# Altium footprint library WR-PHD_Socket Header.PcbLib: 279 footprints (part 3 of 18)
Each footprint in its own frame and in the unit in brackets; x right, y up, seen from the top. Pads: shape width x height; smd on the part's side, far side on the other; paste and mask are expansions set on the pad; w line width, h text height; cw(c..) or ccw(c..) is an arc to the next point about the centre after c.
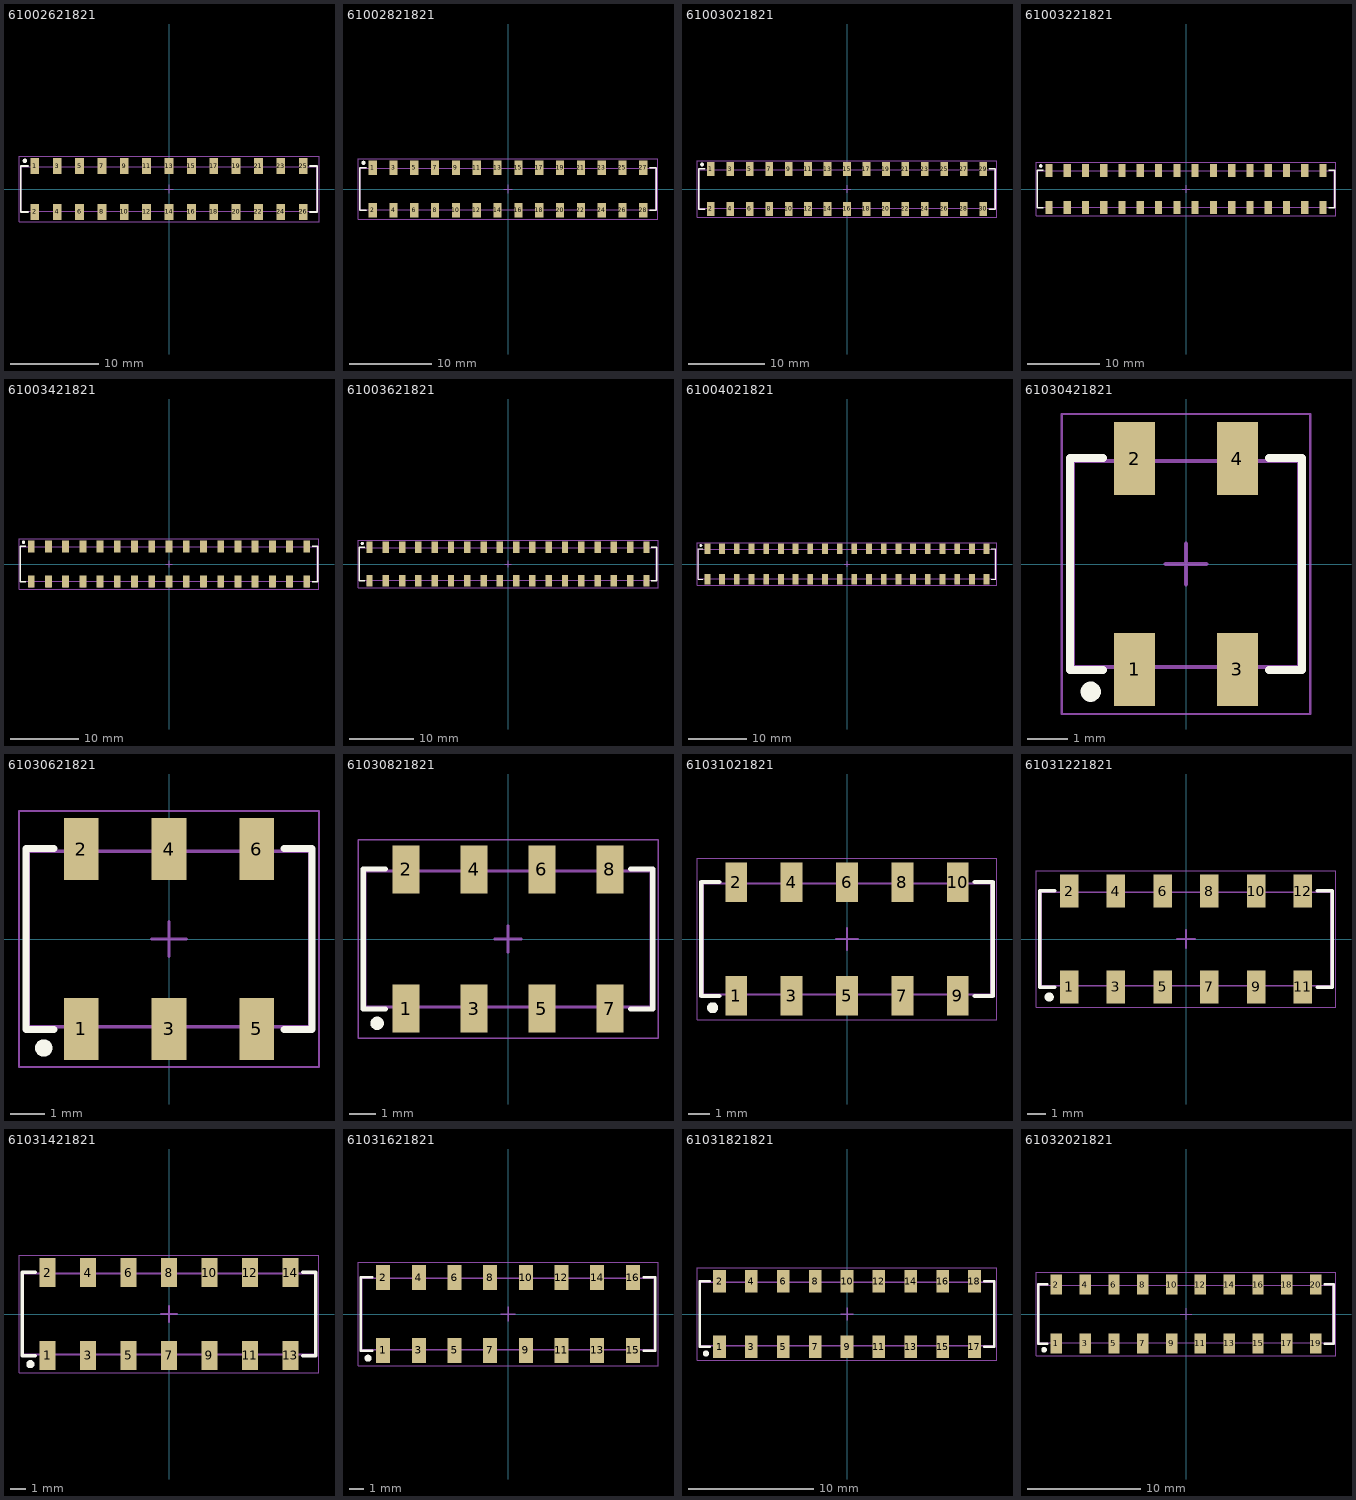
[diagram p2: the footprints below, top view; thin cyan lines are the x and y axes]

## 61002621821 [mm] "Socket Header, Pitch 2.54 mm, SMT, Vertical, dual row, 26p"
height 7.45
pads (26):
  rect 1x1.8 smd: 1(-15.24,2.6) 2(-15.24,-2.6) 3(-12.7,2.6) 4(-12.7,-2.6) 5(-10.16,2.6) 6(-10.16,-2.6) 7(-7.62,2.6) 8(-7.62,-2.6) 9(-5.08,2.6) 10(-5.08,-2.6) 11(-2.54,2.6) 12(-2.54,-2.6) 13(0,2.6) 14(0,-2.6) 15(2.54,2.6) 16(2.54,-2.6) 17(5.08,2.6) 18(5.08,-2.6) 19(7.62,2.6) 20(7.62,-2.6) 21(10.16,2.6) 22(10.16,-2.6) 23(12.7,2.6) 24(12.7,-2.6) 25(15.24,2.6) 26(15.24,-2.6)
Top Overlay:
  circle w0.25: c-16.37,3.2 r0.125
  lines w0.2: -16.02,-2.615 -16.835,-2.615 -16.835,2.615 -16.02,2.615 ; 16.02,-2.615 16.835,-2.615 16.835,2.615 16.02,2.615
Top Component Outline:
  lines w0.1: -15.56,-2.54 -15.56,-3.35 -14.92,-3.35 -14.92,-2.54 ; -15.56,2.54 -15.56,3.35 -14.92,3.35 -14.92,2.54 ; -13.02,-2.54 -13.02,-3.35 -12.38,-3.35 -12.38,-2.54 ; -13.02,2.54 -13.02,3.35 -12.38,3.35 -12.38,2.54 ; -10.48,-2.54 -10.48,-3.35 -9.84,-3.35 -9.84,-2.54 ; -10.48,2.54 -10.48,3.35 -9.84,3.35 -9.84,2.54 ; -7.94,-2.54 -7.94,-3.35 -7.3,-3.35 -7.3,-2.54 ; -7.94,2.54 -7.94,3.35 -7.3,3.35 -7.3,2.54 ; -5.4,-2.54 -5.4,-3.35 -4.76,-3.35 -4.76,-2.54 ; -5.4,2.54 -5.4,3.35 -4.76,3.35 -4.76,2.54 ; -2.86,-2.54 -2.86,-3.35 -2.22,-3.35 -2.22,-2.54 ; -2.86,2.54 -2.86,3.35 -2.22,3.35 -2.22,2.54 ; -0.32,-2.54 -0.32,-3.35 0.32,-3.35 0.32,-2.54 ; -0.32,2.54 -0.32,3.35 0.32,3.35 0.32,2.54 ; 2.22,-2.54 2.22,-3.35 2.86,-3.35 2.86,-2.54 ; 2.22,2.54 2.22,3.35 2.86,3.35 2.86,2.54 ; 4.76,-2.54 4.76,-3.35 5.4,-3.35 5.4,-2.54 ; 4.76,2.54 4.76,3.35 5.4,3.35 5.4,2.54 ; 7.3,-2.54 7.3,-3.35 7.94,-3.35 7.94,-2.54 ; 7.3,2.54 7.3,3.35 7.94,3.35 7.94,2.54 ; 9.84,-2.54 9.84,-3.35 10.48,-3.35 10.48,-2.54 ; 9.84,2.54 9.84,3.35 10.48,3.35 10.48,2.54 ; 12.38,-2.54 12.38,-3.35 13.02,-3.35 13.02,-2.54 ; 12.38,2.54 12.38,3.35 13.02,3.35 13.02,2.54 ; 14.92,-2.54 14.92,-3.35 15.56,-3.35 15.56,-2.54 ; 14.92,2.54 14.92,3.35 15.56,3.35 15.56,2.54 ; -16.76,-2.54 -16.76,2.54 16.76,2.54 16.76,-2.54 -16.76,-2.54
Top Designator:
  text ".Designator" at -3.647,-0.357 h1
Top Courtyard:
  lines w0.05: -17.035,-3.7 17.035,-3.7 17.035,3.7 -17.035,3.7 -17.035,-3.7
Top Component Center:
  lines w0.1: -0.5,0 0.5,0 ; 0,-0.5 0,0.5
3D body "61002621821.stp": height 8.5, standoff 0, extent -16.51,-3.35 16.51,3.35

## 61002821821 [mm] "Socket Header, Pitch 2.54 mm, SMT, Vertical, dual row, 28p"
height 7.45
pads (28):
  rect 1x1.8 smd: 1(-16.51,2.6) 2(-16.51,-2.6) 3(-13.97,2.6) 4(-13.97,-2.6) 5(-11.43,2.6) 6(-11.43,-2.6) 7(-8.89,2.6) 8(-8.89,-2.6) 9(-6.35,2.6) 10(-6.35,-2.6) 11(-3.81,2.6) 12(-3.81,-2.6) 13(-1.27,2.6) 14(-1.27,-2.6) 15(1.27,2.6) 16(1.27,-2.6) 17(3.81,2.6) 18(3.81,-2.6) 19(6.35,2.6) 20(6.35,-2.6) 21(8.89,2.6) 22(8.89,-2.6) 23(11.43,2.6) 24(11.43,-2.6) 25(13.97,2.6) 26(13.97,-2.6) 27(16.51,2.6) 28(16.51,-2.6)
Top Overlay:
  circle w0.25: c-17.64,3.2 r0.125
  lines w0.2: -17.29,-2.615 -18.105,-2.615 -18.105,2.615 -17.29,2.615 ; 17.29,-2.615 18.105,-2.615 18.105,2.615 17.29,2.615
Top Component Outline:
  lines w0.1: -16.83,-2.54 -16.83,-3.35 -16.19,-3.35 -16.19,-2.54 ; -16.83,2.54 -16.83,3.35 -16.19,3.35 -16.19,2.54 ; -14.29,-2.54 -14.29,-3.35 -13.65,-3.35 -13.65,-2.54 ; -14.29,2.54 -14.29,3.35 -13.65,3.35 -13.65,2.54 ; -11.75,-2.54 -11.75,-3.35 -11.11,-3.35 -11.11,-2.54 ; -11.75,2.54 -11.75,3.35 -11.11,3.35 -11.11,2.54 ; -9.21,-2.54 -9.21,-3.35 -8.57,-3.35 -8.57,-2.54 ; -9.21,2.54 -9.21,3.35 -8.57,3.35 -8.57,2.54 ; -6.67,-2.54 -6.67,-3.35 -6.03,-3.35 -6.03,-2.54 ; -6.67,2.54 -6.67,3.35 -6.03,3.35 -6.03,2.54 ; -4.13,-2.54 -4.13,-3.35 -3.49,-3.35 -3.49,-2.54 ; -4.13,2.54 -4.13,3.35 -3.49,3.35 -3.49,2.54 ; -1.59,-2.54 -1.59,-3.35 -0.95,-3.35 -0.95,-2.54 ; -1.59,2.54 -1.59,3.35 -0.95,3.35 -0.95,2.54 ; 0.95,-2.54 0.95,-3.35 1.59,-3.35 1.59,-2.54 ; 0.95,2.54 0.95,3.35 1.59,3.35 1.59,2.54 ; 3.49,-2.54 3.49,-3.35 4.13,-3.35 4.13,-2.54 ; 3.49,2.54 3.49,3.35 4.13,3.35 4.13,2.54 ; 6.03,-2.54 6.03,-3.35 6.67,-3.35 6.67,-2.54 ; 6.03,2.54 6.03,3.35 6.67,3.35 6.67,2.54 ; 8.57,-2.54 8.57,-3.35 9.21,-3.35 9.21,-2.54 ; 8.57,2.54 8.57,3.35 9.21,3.35 9.21,2.54 ; 11.11,-2.54 11.11,-3.35 11.75,-3.35 11.75,-2.54 ; 11.11,2.54 11.11,3.35 11.75,3.35 11.75,2.54 ; 13.65,-2.54 13.65,-3.35 14.29,-3.35 14.29,-2.54 ; 13.65,2.54 13.65,3.35 14.29,3.35 14.29,2.54 ; 16.19,-2.54 16.19,-3.35 16.83,-3.35 16.83,-2.54 ; 16.19,2.54 16.19,3.35 16.83,3.35 16.83,2.54 ; -18.03,-2.54 -18.03,2.54 18.03,2.54 18.03,-2.54 -18.03,-2.54
Top Designator:
  text ".Designator" at -3.647,-0.357 h1
Top Courtyard:
  lines w0.05: -18.305,-3.7 -18.305,3.7 18.305,3.7 18.305,-3.7 -18.305,-3.7
Top Component Center:
  lines w0.1: -0.5,0 0.5,0 ; 0,-0.5 0,0.5
3D body "61002821821.stp": height 8.5, standoff 0, extent -17.78,-3.35 17.78,3.35

## 61003021821 [mm] "Socket Header, Pitch 2.54 mm, SMT, Vertical, dual row, 30p"
height 7.45
pads (30):
  rect 1x1.8 smd: 1(-17.78,2.6) 2(-17.78,-2.6) 3(-15.24,2.6) 4(-15.24,-2.6) 5(-12.7,2.6) 6(-12.7,-2.6) 7(-10.16,2.6) 8(-10.16,-2.6) 9(-7.62,2.6) 10(-7.62,-2.6) 11(-5.08,2.6) 12(-5.08,-2.6) 13(-2.54,2.6) 14(-2.54,-2.6) 15(0,2.6) 16(0,-2.6) 17(2.54,2.6) 18(2.54,-2.6) 19(5.08,2.6) 20(5.08,-2.6) 21(7.62,2.6) 22(7.62,-2.6) 23(10.16,2.6) 24(10.16,-2.6) 25(12.7,2.6) 26(12.7,-2.6) 27(15.24,2.6) 28(15.24,-2.6) 29(17.78,2.6) 30(17.78,-2.6)
Top Overlay:
  circle w0.25: c-18.91,3.2 r0.125
  lines w0.2: -18.56,-2.615 -19.375,-2.615 -19.375,2.615 -18.56,2.615 ; 18.56,-2.615 19.375,-2.615 19.375,2.615 18.56,2.615
Top Component Outline:
  lines w0.1: -18.1,-2.54 -18.1,-3.35 -17.46,-3.35 -17.46,-2.54 ; -18.1,2.54 -18.1,3.35 -17.46,3.35 -17.46,2.54 ; -15.56,-2.54 -15.56,-3.35 -14.92,-3.35 -14.92,-2.54 ; -15.56,2.54 -15.56,3.35 -14.92,3.35 -14.92,2.54 ; -13.02,-2.54 -13.02,-3.35 -12.38,-3.35 -12.38,-2.54 ; -13.02,2.54 -13.02,3.35 -12.38,3.35 -12.38,2.54 ; -10.48,-2.54 -10.48,-3.35 -9.84,-3.35 -9.84,-2.54 ; -10.48,2.54 -10.48,3.35 -9.84,3.35 -9.84,2.54 ; -7.94,-2.54 -7.94,-3.35 -7.3,-3.35 -7.3,-2.54 ; -7.94,2.54 -7.94,3.35 -7.3,3.35 -7.3,2.54 ; -5.4,-2.54 -5.4,-3.35 -4.76,-3.35 -4.76,-2.54 ; -5.4,2.54 -5.4,3.35 -4.76,3.35 -4.76,2.54 ; -2.86,-2.54 -2.86,-3.35 -2.22,-3.35 -2.22,-2.54 ; -2.86,2.54 -2.86,3.35 -2.22,3.35 -2.22,2.54 ; -0.32,-2.54 -0.32,-3.35 0.32,-3.35 0.32,-2.54 ; -0.32,2.54 -0.32,3.35 0.32,3.35 0.32,2.54 ; 2.22,-2.54 2.22,-3.35 2.86,-3.35 2.86,-2.54 ; 2.22,2.54 2.22,3.35 2.86,3.35 2.86,2.54 ; 4.76,-2.54 4.76,-3.35 5.4,-3.35 5.4,-2.54 ; 4.76,2.54 4.76,3.35 5.4,3.35 5.4,2.54 ; 7.3,-2.54 7.3,-3.35 7.94,-3.35 7.94,-2.54 ; 7.3,2.54 7.3,3.35 7.94,3.35 7.94,2.54 ; 9.84,-2.54 9.84,-3.35 10.48,-3.35 10.48,-2.54 ; 9.84,2.54 9.84,3.35 10.48,3.35 10.48,2.54 ; 12.38,-2.54 12.38,-3.35 13.02,-3.35 13.02,-2.54 ; 12.38,2.54 12.38,3.35 13.02,3.35 13.02,2.54 ; 14.92,-2.54 14.92,-3.35 15.56,-3.35 15.56,-2.54 ; 14.92,2.54 14.92,3.35 15.56,3.35 15.56,2.54 ; 17.46,-2.54 17.46,-3.35 18.1,-3.35 18.1,-2.54 ; 17.46,2.54 17.46,3.35 18.1,3.35 18.1,2.54 ; -19.3,-2.54 -19.3,2.54 19.3,2.54 19.3,-2.54 -19.3,-2.54
Top Designator:
  text ".Designator" at -3.647,-0.357 h1
Top Courtyard:
  lines w0.05: -19.575,-3.7 19.575,-3.7 19.575,3.7 -19.575,3.7 -19.575,-3.7
Top Component Center:
  lines w0.1: -0.5,0 0.5,0 ; 0,-0.5 0,0.5
3D body "61003021821.stp": height 8.5, standoff 0, extent -19.05,-3.35 19.05,3.35

## 61003221821 [mm] "Socket Header, Pitch 2.54 mm, SMT, Vertical, dual row, 32p"
height 7.45
pads (32):
  rect 1x1.8 smd: 1(-19.05,2.6) 2(-19.05,-2.6) 3(-16.51,2.6) 4(-16.51,-2.6) 5(-13.97,2.6) 6(-13.97,-2.6) 7(-11.43,2.6) 8(-11.43,-2.6) 9(-8.89,2.6) 10(-8.89,-2.6) 11(-6.35,2.6) 12(-6.35,-2.6) 13(-3.81,2.6) 14(-3.81,-2.6) 15(-1.27,2.6) 16(-1.27,-2.6) 17(1.27,2.6) 18(1.27,-2.6) 19(3.81,2.6) 20(3.81,-2.6) 21(6.35,2.6) 22(6.35,-2.6) 23(8.89,2.6) 24(8.89,-2.6) 25(11.43,2.6) 26(11.43,-2.6) 27(13.97,2.6) 28(13.97,-2.6) 29(16.51,2.6) 30(16.51,-2.6) 31(19.05,2.6) 32(19.05,-2.6)
Top Overlay:
  circle w0.25: c-20.18,3.2 r0.125
  lines w0.2: -19.83,-2.615 -20.645,-2.615 -20.645,2.615 -19.83,2.615 ; 19.83,-2.615 20.645,-2.615 20.645,2.615 19.83,2.615
Top Component Outline:
  lines w0.1: -19.37,-2.54 -19.37,-3.35 -18.73,-3.35 -18.73,-2.54 ; -19.37,2.54 -19.37,3.35 -18.73,3.35 -18.73,2.54 ; -16.83,-2.54 -16.83,-3.35 -16.19,-3.35 -16.19,-2.54 ; -16.83,2.54 -16.83,3.35 -16.19,3.35 -16.19,2.54 ; -14.29,-2.54 -14.29,-3.35 -13.65,-3.35 -13.65,-2.54 ; -14.29,2.54 -14.29,3.35 -13.65,3.35 -13.65,2.54 ; -11.75,-2.54 -11.75,-3.35 -11.11,-3.35 -11.11,-2.54 ; -11.75,2.54 -11.75,3.35 -11.11,3.35 -11.11,2.54 ; -9.21,-2.54 -9.21,-3.35 -8.57,-3.35 -8.57,-2.54 ; -9.21,2.54 -9.21,3.35 -8.57,3.35 -8.57,2.54 ; -6.67,-2.54 -6.67,-3.35 -6.03,-3.35 -6.03,-2.54 ; -6.67,2.54 -6.67,3.35 -6.03,3.35 -6.03,2.54 ; -4.13,-2.54 -4.13,-3.35 -3.49,-3.35 -3.49,-2.54 ; -4.13,2.54 -4.13,3.35 -3.49,3.35 -3.49,2.54 ; -1.59,-2.54 -1.59,-3.35 -0.95,-3.35 -0.95,-2.54 ; -1.59,2.54 -1.59,3.35 -0.95,3.35 -0.95,2.54 ; 0.95,-2.54 0.95,-3.35 1.59,-3.35 1.59,-2.54 ; 0.95,2.54 0.95,3.35 1.59,3.35 1.59,2.54 ; 3.49,-2.54 3.49,-3.35 4.13,-3.35 4.13,-2.54 ; 3.49,2.54 3.49,3.35 4.13,3.35 4.13,2.54 ; 6.03,-2.54 6.03,-3.35 6.67,-3.35 6.67,-2.54 ; 6.03,2.54 6.03,3.35 6.67,3.35 6.67,2.54 ; 8.57,-2.54 8.57,-3.35 9.21,-3.35 9.21,-2.54 ; 8.57,2.54 8.57,3.35 9.21,3.35 9.21,2.54 ; 11.11,-2.54 11.11,-3.35 11.75,-3.35 11.75,-2.54 ; 11.11,2.54 11.11,3.35 11.75,3.35 11.75,2.54 ; 13.65,-2.54 13.65,-3.35 14.29,-3.35 14.29,-2.54 ; 13.65,2.54 13.65,3.35 14.29,3.35 14.29,2.54 ; 16.19,-2.54 16.19,-3.35 16.83,-3.35 16.83,-2.54 ; 16.19,2.54 16.19,3.35 16.83,3.35 16.83,2.54 ; 18.73,-2.54 18.73,-3.35 19.37,-3.35 19.37,-2.54 ; 18.73,2.54 18.73,3.35 19.37,3.35 19.37,2.54 ; -20.57,-2.54 -20.57,2.54 20.57,2.54 20.57,-2.54 -20.57,-2.54
Top Designator:
  text ".Designator" at -3.647,-0.357 h1
Top Courtyard:
  lines w0.05: -20.845,-3.7 20.845,-3.7 20.845,3.7 -20.845,3.7 -20.845,-3.7
Top Component Center:
  lines w0.1: -0.5,0 0.5,0 ; 0,-0.5 0,0.5
3D body "61003221821.stp": height 8.5, standoff 0, extent -20.32,-3.35 20.32,3.35

## 61003421821 [mm] "Socket Header, Pitch 2.54 mm, SMT, Vertical, dual row, 34p"
height 7.45
pads (34):
  rect 1x1.8 smd: 1(-20.32,2.6) 2(-20.32,-2.6) 3(-17.78,2.6) 4(-17.78,-2.6) 5(-15.24,2.6) 6(-15.24,-2.6) 7(-12.7,2.6) 8(-12.7,-2.6) 9(-10.16,2.6) 10(-10.16,-2.6) 11(-7.62,2.6) 12(-7.62,-2.6) 13(-5.08,2.6) 14(-5.08,-2.6) 15(-2.54,2.6) 16(-2.54,-2.6) 17(0,2.6) 18(0,-2.6) 19(2.54,2.6) 20(2.54,-2.6) 21(5.08,2.6) 22(5.08,-2.6) 23(7.62,2.6) 24(7.62,-2.6) 25(10.16,2.6) 26(10.16,-2.6) 27(12.7,2.6) 28(12.7,-2.6) 29(15.24,2.6) 30(15.24,-2.6) 31(17.78,2.6) 32(17.78,-2.6) 33(20.32,2.6) 34(20.32,-2.6)
Top Overlay:
  circle w0.25: c-21.45,3.2 r0.125
  lines w0.2: -21.1,-2.615 -21.915,-2.615 -21.915,2.615 -21.1,2.615 ; 21.1,-2.615 21.915,-2.615 21.915,2.615 21.1,2.615
Top Component Outline:
  lines w0.1: -20.64,-2.54 -20.64,-3.35 -20,-3.35 -20,-2.54 ; -20.64,2.54 -20.64,3.35 -20,3.35 -20,2.54 ; -18.1,-2.54 -18.1,-3.35 -17.46,-3.35 -17.46,-2.54 ; -18.1,2.54 -18.1,3.35 -17.46,3.35 -17.46,2.54 ; -15.56,-2.54 -15.56,-3.35 -14.92,-3.35 -14.92,-2.54 ; -15.56,2.54 -15.56,3.35 -14.92,3.35 -14.92,2.54 ; -13.02,-2.54 -13.02,-3.35 -12.38,-3.35 -12.38,-2.54 ; -13.02,2.54 -13.02,3.35 -12.38,3.35 -12.38,2.54 ; -10.48,-2.54 -10.48,-3.35 -9.84,-3.35 -9.84,-2.54 ; -10.48,2.54 -10.48,3.35 -9.84,3.35 -9.84,2.54 ; -7.94,-2.54 -7.94,-3.35 -7.3,-3.35 -7.3,-2.54 ; -7.94,2.54 -7.94,3.35 -7.3,3.35 -7.3,2.54 ; -5.4,-2.54 -5.4,-3.35 -4.76,-3.35 -4.76,-2.54 ; -5.4,2.54 -5.4,3.35 -4.76,3.35 -4.76,2.54 ; -2.86,-2.54 -2.86,-3.35 -2.22,-3.35 -2.22,-2.54 ; -2.86,2.54 -2.86,3.35 -2.22,3.35 -2.22,2.54 ; -0.32,-2.54 -0.32,-3.35 0.32,-3.35 0.32,-2.54 ; -0.32,2.54 -0.32,3.35 0.32,3.35 0.32,2.54 ; 2.22,-2.54 2.22,-3.35 2.86,-3.35 2.86,-2.54 ; 2.22,2.54 2.22,3.35 2.86,3.35 2.86,2.54 ; 4.76,-2.54 4.76,-3.35 5.4,-3.35 5.4,-2.54 ; 4.76,2.54 4.76,3.35 5.4,3.35 5.4,2.54 ; 7.3,-2.54 7.3,-3.35 7.94,-3.35 7.94,-2.54 ; 7.3,2.54 7.3,3.35 7.94,3.35 7.94,2.54 ; 9.84,-2.54 9.84,-3.35 10.48,-3.35 10.48,-2.54 ; 9.84,2.54 9.84,3.35 10.48,3.35 10.48,2.54 ; 12.38,-2.54 12.38,-3.35 13.02,-3.35 13.02,-2.54 ; 12.38,2.54 12.38,3.35 13.02,3.35 13.02,2.54 ; 14.92,-2.54 14.92,-3.35 15.56,-3.35 15.56,-2.54 ; 14.92,2.54 14.92,3.35 15.56,3.35 15.56,2.54 ; 17.46,-2.54 17.46,-3.35 18.1,-3.35 18.1,-2.54 ; 17.46,2.54 17.46,3.35 18.1,3.35 18.1,2.54 ; 20,-2.54 20,-3.35 20.64,-3.35 20.64,-2.54 ; 20,2.54 20,3.35 20.64,3.35 20.64,2.54 ; -21.84,-2.54 -21.84,2.54 21.84,2.54 21.84,-2.54 -21.84,-2.54
Top Designator:
  text ".Designator" at -3.647,-0.357 h1
Top Courtyard:
  lines w0.05: -22.115,-3.7 -22.115,3.7 22.115,3.7 22.115,-3.7 -22.115,-3.7
Top Component Center:
  lines w0.1: -0.5,0 0.5,0 ; 0,-0.5 0,0.5
3D body "61003421821.stp": height 7.5, standoff 0, extent -21.59,-3.35 21.59,3.35

## 61003621821 [mm] "Socket Header, Pitch 2.54 mm, SMT, Vertical, dual row, 36p"
height 7.45
pads (36):
  rect 1x1.8 smd: 1(-21.59,2.6) 2(-21.59,-2.6) 3(-19.05,2.6) 4(-19.05,-2.6) 5(-16.51,2.6) 6(-16.51,-2.6) 7(-13.97,2.6) 8(-13.97,-2.6) 9(-11.43,2.6) 10(-11.43,-2.6) 11(-8.89,2.6) 12(-8.89,-2.6) 13(-6.35,2.6) 14(-6.35,-2.6) 15(-3.81,2.6) 16(-3.81,-2.6) 17(-1.27,2.6) 18(-1.27,-2.6) 19(1.27,2.6) 20(1.27,-2.6) 21(3.81,2.6) 22(3.81,-2.6) 23(6.35,2.6) 24(6.35,-2.6) 25(8.89,2.6) 26(8.89,-2.6) 27(11.43,2.6) 28(11.43,-2.6) 29(13.97,2.6) 30(13.97,-2.6) 31(16.51,2.6) 32(16.51,-2.6) 33(19.05,2.6) 34(19.05,-2.6) 35(21.59,2.6) 36(21.59,-2.6)
Top Overlay:
  circle w0.25: c-22.72,3.2 r0.125
  lines w0.2: -22.37,-2.615 -23.185,-2.615 -23.185,2.615 -22.37,2.615 ; 22.37,-2.615 23.185,-2.615 23.185,2.615 22.37,2.615
Top Component Outline:
  lines w0.1: -21.91,-2.54 -21.91,-3.35 -21.27,-3.35 -21.27,-2.54 ; -21.91,2.54 -21.91,3.35 -21.27,3.35 -21.27,2.54 ; -19.37,-2.54 -19.37,-3.35 -18.73,-3.35 -18.73,-2.54 ; -19.37,2.54 -19.37,3.35 -18.73,3.35 -18.73,2.54 ; -16.83,-2.54 -16.83,-3.35 -16.19,-3.35 -16.19,-2.54 ; -16.83,2.54 -16.83,3.35 -16.19,3.35 -16.19,2.54 ; -14.29,-2.54 -14.29,-3.35 -13.65,-3.35 -13.65,-2.54 ; -14.29,2.54 -14.29,3.35 -13.65,3.35 -13.65,2.54 ; -11.75,-2.54 -11.75,-3.35 -11.11,-3.35 -11.11,-2.54 ; -11.75,2.54 -11.75,3.35 -11.11,3.35 -11.11,2.54 ; -9.21,-2.54 -9.21,-3.35 -8.57,-3.35 -8.57,-2.54 ; -9.21,2.54 -9.21,3.35 -8.57,3.35 -8.57,2.54 ; -6.67,-2.54 -6.67,-3.35 -6.03,-3.35 -6.03,-2.54 ; -6.67,2.54 -6.67,3.35 -6.03,3.35 -6.03,2.54 ; -4.13,-2.54 -4.13,-3.35 -3.49,-3.35 -3.49,-2.54 ; -4.13,2.54 -4.13,3.35 -3.49,3.35 -3.49,2.54 ; -1.59,-2.54 -1.59,-3.35 -0.95,-3.35 -0.95,-2.54 ; -1.59,2.54 -1.59,3.35 -0.95,3.35 -0.95,2.54 ; 0.95,-2.54 0.95,-3.35 1.59,-3.35 1.59,-2.54 ; 0.95,2.54 0.95,3.35 1.59,3.35 1.59,2.54 ; 3.49,-2.54 3.49,-3.35 4.13,-3.35 4.13,-2.54 ; 3.49,2.54 3.49,3.35 4.13,3.35 4.13,2.54 ; 6.03,-2.54 6.03,-3.35 6.67,-3.35 6.67,-2.54 ; 6.03,2.54 6.03,3.35 6.67,3.35 6.67,2.54 ; 8.57,-2.54 8.57,-3.35 9.21,-3.35 9.21,-2.54 ; 8.57,2.54 8.57,3.35 9.21,3.35 9.21,2.54 ; 11.11,-2.54 11.11,-3.35 11.75,-3.35 11.75,-2.54 ; 11.11,2.54 11.11,3.35 11.75,3.35 11.75,2.54 ; 13.65,-2.54 13.65,-3.35 14.29,-3.35 14.29,-2.54 ; 13.65,2.54 13.65,3.35 14.29,3.35 14.29,2.54 ; 16.19,-2.54 16.19,-3.35 16.83,-3.35 16.83,-2.54 ; 16.19,2.54 16.19,3.35 16.83,3.35 16.83,2.54 ; 18.73,-2.54 18.73,-3.35 19.37,-3.35 19.37,-2.54 ; 18.73,2.54 18.73,3.35 19.37,3.35 19.37,2.54 ; 21.27,-2.54 21.27,-3.35 21.91,-3.35 21.91,-2.54 ; 21.27,2.54 21.27,3.35 21.91,3.35 21.91,2.54 ; -23.11,-2.54 -23.11,2.54 23.11,2.54 23.11,-2.54 -23.11,-2.54
Top Designator:
  text ".Designator" at -3.647,-0.357 h1
Top Courtyard:
  lines w0.05: -23.385,-3.7 23.385,-3.7 23.385,3.7 -23.385,3.7 -23.385,-3.7
Top Component Center:
  lines w0.1: -0.5,0 0.5,0 ; 0,-0.5 0,0.5
3D body "61003621821.stp": height 7.5, standoff 0, extent -22.86,-3.35 22.86,3.35

## 61004021821 [mm] "Socket Header, Pitch 2.54 mm, SMT, Vertical, dual row, 40p"
height 7.45
pads (40):
  rect 1x1.8 smd: 1(-24.13,2.6) 2(-24.13,-2.6) 3(-21.59,2.6) 4(-21.59,-2.6) 5(-19.05,2.6) 6(-19.05,-2.6) 7(-16.51,2.6) 8(-16.51,-2.6) 9(-13.97,2.6) 10(-13.97,-2.6) 11(-11.43,2.6) 12(-11.43,-2.6) 13(-8.89,2.6) 14(-8.89,-2.6) 15(-6.35,2.6) 16(-6.35,-2.6) 17(-3.81,2.6) 18(-3.81,-2.6) 19(-1.27,2.6) 20(-1.27,-2.6) 21(1.27,2.6) 22(1.27,-2.6) 23(3.81,2.6) 24(3.81,-2.6) 25(6.35,2.6) 26(6.35,-2.6) 27(8.89,2.6) 28(8.89,-2.6) 29(11.43,2.6) 30(11.43,-2.6) 31(13.97,2.6) 32(13.97,-2.6) 33(16.51,2.6) 34(16.51,-2.6) 35(19.05,2.6) 36(19.05,-2.6) 37(21.59,2.6) 38(21.59,-2.6) 39(24.13,2.6) 40(24.13,-2.6)
Top Overlay:
  circle w0.25: c-25.26,3.2 r0.125
  lines w0.2: -24.91,-2.615 -25.725,-2.615 -25.725,2.615 -24.91,2.615 ; 24.91,-2.615 25.725,-2.615 25.725,2.615 24.91,2.615
Top Component Outline:
  lines w0.1: -24.45,-2.54 -24.45,-3.35 -23.81,-3.35 -23.81,-2.54 ; -24.45,2.54 -24.45,3.35 -23.81,3.35 -23.81,2.54 ; -21.91,-2.54 -21.91,-3.35 -21.27,-3.35 -21.27,-2.54 ; -21.91,2.54 -21.91,3.35 -21.27,3.35 -21.27,2.54 ; -19.37,-2.54 -19.37,-3.35 -18.73,-3.35 -18.73,-2.54 ; -19.37,2.54 -19.37,3.35 -18.73,3.35 -18.73,2.54 ; -16.83,-2.54 -16.83,-3.35 -16.19,-3.35 -16.19,-2.54 ; -16.83,2.54 -16.83,3.35 -16.19,3.35 -16.19,2.54 ; -14.29,-2.54 -14.29,-3.35 -13.65,-3.35 -13.65,-2.54 ; -14.29,2.54 -14.29,3.35 -13.65,3.35 -13.65,2.54 ; -11.75,-2.54 -11.75,-3.35 -11.11,-3.35 -11.11,-2.54 ; -11.75,2.54 -11.75,3.35 -11.11,3.35 -11.11,2.54 ; -9.21,-2.54 -9.21,-3.35 -8.57,-3.35 -8.57,-2.54 ; -9.21,2.54 -9.21,3.35 -8.57,3.35 -8.57,2.54 ; -6.67,-2.54 -6.67,-3.35 -6.03,-3.35 -6.03,-2.54 ; -6.67,2.54 -6.67,3.35 -6.03,3.35 -6.03,2.54 ; -4.13,-2.54 -4.13,-3.35 -3.49,-3.35 -3.49,-2.54 ; -4.13,2.54 -4.13,3.35 -3.49,3.35 -3.49,2.54 ; -1.59,-2.54 -1.59,-3.35 -0.95,-3.35 -0.95,-2.54 ; -1.59,2.54 -1.59,3.35 -0.95,3.35 -0.95,2.54 ; 0.95,-2.54 0.95,-3.35 1.59,-3.35 1.59,-2.54 ; 0.95,2.54 0.95,3.35 1.59,3.35 1.59,2.54 ; 3.49,-2.54 3.49,-3.35 4.13,-3.35 4.13,-2.54 ; 3.49,2.54 3.49,3.35 4.13,3.35 4.13,2.54 ; 6.03,-2.54 6.03,-3.35 6.67,-3.35 6.67,-2.54 ; 6.03,2.54 6.03,3.35 6.67,3.35 6.67,2.54 ; 8.57,-2.54 8.57,-3.35 9.21,-3.35 9.21,-2.54 ; 8.57,2.54 8.57,3.35 9.21,3.35 9.21,2.54 ; 11.11,-2.54 11.11,-3.35 11.75,-3.35 11.75,-2.54 ; 11.11,2.54 11.11,3.35 11.75,3.35 11.75,2.54 ; 13.65,-2.54 13.65,-3.35 14.29,-3.35 14.29,-2.54 ; 13.65,2.54 13.65,3.35 14.29,3.35 14.29,2.54 ; 16.19,-2.54 16.19,-3.35 16.83,-3.35 16.83,-2.54 ; 16.19,2.54 16.19,3.35 16.83,3.35 16.83,2.54 ; 18.73,-2.54 18.73,-3.35 19.37,-3.35 19.37,-2.54 ; 18.73,2.54 18.73,3.35 19.37,3.35 19.37,2.54 ; 21.27,-2.54 21.27,-3.35 21.91,-3.35 21.91,-2.54 ; 21.27,2.54 21.27,3.35 21.91,3.35 21.91,2.54 ; 23.81,-2.54 23.81,-3.35 24.45,-3.35 24.45,-2.54 ; 23.81,2.54 23.81,3.35 24.45,3.35 24.45,2.54 ; -25.65,-2.54 -25.65,2.54 25.65,2.54 25.65,-2.54 -25.65,-2.54
Top Designator:
  text ".Designator" at -3.647,-0.357 h1
Top Courtyard:
  lines w0.05: -25.925,-3.7 25.925,-3.7 25.925,3.7 -25.925,3.7 -25.925,-3.7
Top Component Center:
  lines w0.1: -0.5,0 0.5,0 ; 0,-0.5 0,0.5
3D body "61004021821.stp": height 7.5, standoff 0, extent -25.4,-3.35 25.4,3.35

## 61030421821 [mm] "Socket Header, Pitch 2.54 mm, SMT, Vertical, dual row, 4p"
height 7.45
pads (4):
  rect 1x1.8 smd: 1(-1.27,-2.6) 2(-1.27,2.6) 3(1.27,-2.6) 4(1.27,2.6)
Top Overlay:
  circle w0.25: c-2.35,-3.15 r0.125
  lines w0.2: -2.05,-2.615 -2.865,-2.615 -2.865,2.615 -2.05,2.615 ; 2.05,-2.615 2.865,-2.615 2.865,2.615 2.05,2.615
Top Component Outline:
  lines w0.1: -1.59,-2.54 -1.59,-3.35 -0.95,-3.35 -0.95,-2.54 ; -1.59,2.54 -1.59,3.35 -0.95,3.35 -0.95,2.54 ; 0.95,-2.54 0.95,-3.35 1.59,-3.35 1.59,-2.54 ; 0.95,2.54 0.95,3.35 1.59,3.35 1.59,2.54 ; -2.79,-2.54 2.79,-2.54 2.79,2.54 -2.79,2.54 -2.79,-2.54
Top Designator:
  text ".Designator" at -3.647,-0.357 h1
Top Courtyard:
  lines w0.05: -3.065,-3.7 -3.065,3.7 3.065,3.7 3.065,-3.7 -3.065,-3.7
Top Component Center:
  lines w0.1: -0.5,0 0.5,0 ; 0,-0.5 0,0.5
3D body "61030421821.stp": height 8.52, standoff -0.03, extent -2.54,-3.35 2.54,3.35

## 61030621821 [mm] "Socket Header, Pitch 2.54 mm, SMT, Vertical, dual row, 6p"
height 7.45
pads (6):
  rect 1x1.8 smd: 1(-2.54,-2.6) 2(-2.54,2.6) 3(0,-2.6) 4(0,2.6) 5(2.54,-2.6) 6(2.54,2.6)
Top Overlay:
  circle w0.25: c-3.62,-3.15 r0.125
  lines w0.2: -3.32,-2.615 -4.135,-2.615 -4.135,2.615 -3.32,2.615 ; 3.32,-2.615 4.135,-2.615 4.135,2.615 3.32,2.615
Top Component Outline:
  lines w0.1: -2.86,-2.54 -2.86,-3.35 -2.22,-3.35 -2.22,-2.54 ; -2.86,2.54 -2.86,3.35 -2.22,3.35 -2.22,2.54 ; -0.32,-2.54 -0.32,-3.35 0.32,-3.35 0.32,-2.54 ; -0.32,2.54 -0.32,3.35 0.32,3.35 0.32,2.54 ; 2.22,-2.54 2.22,-3.35 2.86,-3.35 2.86,-2.54 ; 2.22,2.54 2.22,3.35 2.86,3.35 2.86,2.54 ; -4.06,-2.54 -4.06,2.54 4.06,2.54 4.06,-2.54 -4.06,-2.54
Top Designator:
  text ".Designator" at -3.647,-0.357 h1
Top Courtyard:
  lines w0.05: -4.335,-3.7 4.335,-3.7 4.335,3.7 -4.335,3.7 -4.335,-3.7
Top Component Center:
  lines w0.1: -0.5,0 0.5,0 ; 0,-0.5 0,0.5
3D body "61030621821.stp": height 8.52, standoff 0.02, extent -3.81,-3.35 3.81,3.35

## 61030821821 [mm] "Socket Header, Pitch 2.54 mm, SMT, Vertical, dual row, 8p"
height 7.45
pads (8):
  rect 1x1.8 smd: 1(-3.81,-2.6) 2(-3.81,2.6) 3(-1.27,-2.6) 4(-1.27,2.6) 5(1.27,-2.6) 6(1.27,2.6) 7(3.81,-2.6) 8(3.81,2.6)
Top Overlay:
  circle w0.25: c-4.89,-3.15 r0.125
  lines w0.2: -4.59,-2.615 -5.405,-2.615 -5.405,2.615 -4.59,2.615 ; 4.59,-2.615 5.405,-2.615 5.405,2.615 4.59,2.615
Top Component Outline:
  lines w0.1: -4.13,-2.54 -4.13,-3.35 -3.49,-3.35 -3.49,-2.54 ; -4.13,2.54 -4.13,3.35 -3.49,3.35 -3.49,2.54 ; -1.59,-2.54 -1.59,-3.35 -0.95,-3.35 -0.95,-2.54 ; -1.59,2.54 -1.59,3.35 -0.95,3.35 -0.95,2.54 ; 0.95,-2.54 0.95,-3.35 1.59,-3.35 1.59,-2.54 ; 0.95,2.54 0.95,3.35 1.59,3.35 1.59,2.54 ; 3.49,-2.54 3.49,-3.35 4.13,-3.35 4.13,-2.54 ; 3.49,2.54 3.49,3.35 4.13,3.35 4.13,2.54 ; -5.33,-2.54 -5.33,2.54 5.33,2.54 5.33,-2.54 -5.33,-2.54
Top Designator:
  text ".Designator" at -3.647,-0.357 h1
Top Courtyard:
  lines w0.05: -5.605,-3.7 -5.605,3.7 5.605,3.7 5.605,-3.7 -5.605,-3.7
Top Component Center:
  lines w0.1: -0.5,0 0.5,0 ; 0,-0.5 0,0.5
3D body "61030821821.stp": height 8.52, standoff 0.02, extent -5.08,-3.35 5.08,3.35

## 61031021821 [mm] "Socket Header, Pitch 2.54 mm, SMT, Vertical, dual row, 10p"
height 7.45
pads (10):
  rect 1x1.8 smd: 1(-5.08,-2.6) 2(-5.08,2.6) 3(-2.54,-2.6) 4(-2.54,2.6) 5(0,-2.6) 6(0,2.6) 7(2.54,-2.6) 8(2.54,2.6) 9(5.08,-2.6) 10(5.08,2.6)
Top Overlay:
  circle w0.25: c-6.16,-3.15 r0.125
  lines w0.2: -5.86,-2.615 -6.675,-2.615 -6.675,2.615 -5.86,2.615 ; 5.86,-2.615 6.675,-2.615 6.675,2.615 5.86,2.615
Top Component Outline:
  lines w0.1: -5.4,-2.54 -5.4,-3.35 -4.76,-3.35 -4.76,-2.54 ; -5.4,2.54 -5.4,3.35 -4.76,3.35 -4.76,2.54 ; -2.86,-2.54 -2.86,-3.35 -2.22,-3.35 -2.22,-2.54 ; -2.86,2.54 -2.86,3.35 -2.22,3.35 -2.22,2.54 ; -0.32,-2.54 -0.32,-3.35 0.32,-3.35 0.32,-2.54 ; -0.32,2.54 -0.32,3.35 0.32,3.35 0.32,2.54 ; 2.22,-2.54 2.22,-3.35 2.86,-3.35 2.86,-2.54 ; 2.22,2.54 2.22,3.35 2.86,3.35 2.86,2.54 ; 4.76,-2.54 4.76,-3.35 5.4,-3.35 5.4,-2.54 ; 4.76,2.54 4.76,3.35 5.4,3.35 5.4,2.54 ; -6.6,-2.54 6.6,-2.54 6.6,2.54 -6.6,2.54 -6.6,-2.54
Top Designator:
  text ".Designator" at -3.647,-0.357 h1
Top Courtyard:
  lines w0.05: -6.875,-3.7 -6.875,3.7 6.875,3.7 6.875,-3.7 -6.875,-3.7
Top Component Center:
  lines w0.1: -0.5,0 0.5,0 ; 0,-0.5 0,0.5
3D body "61031021821.stp": height 8.52, standoff 0.02, extent -6.35,-3.35 6.35,3.35

## 61031221821 [mm] "Socket Header, Pitch 2.54 mm, SMT, Vertical, dual row, 12p"
height 7.45
pads (12):
  rect 1x1.8 smd: 1(-6.35,-2.6) 2(-6.35,2.6) 3(-3.81,-2.6) 4(-3.81,2.6) 5(-1.27,-2.6) 6(-1.27,2.6) 7(1.27,-2.6) 8(1.27,2.6) 9(3.81,-2.6) 10(3.81,2.6) 11(6.35,-2.6) 12(6.35,2.6)
Top Overlay:
  circle w0.25: c-7.43,-3.15 r0.125
  lines w0.2: -7.13,-2.615 -7.945,-2.615 -7.945,2.615 -7.13,2.615 ; 7.13,-2.615 7.945,-2.615 7.945,2.615 7.13,2.615
Top Component Outline:
  lines w0.1: -6.67,-2.54 -6.67,-3.35 -6.03,-3.35 -6.03,-2.54 ; -6.67,2.54 -6.67,3.35 -6.03,3.35 -6.03,2.54 ; -4.13,-2.54 -4.13,-3.35 -3.49,-3.35 -3.49,-2.54 ; -4.13,2.54 -4.13,3.35 -3.49,3.35 -3.49,2.54 ; -1.59,-2.54 -1.59,-3.35 -0.95,-3.35 -0.95,-2.54 ; -1.59,2.54 -1.59,3.35 -0.95,3.35 -0.95,2.54 ; 0.95,-2.54 0.95,-3.35 1.59,-3.35 1.59,-2.54 ; 0.95,2.54 0.95,3.35 1.59,3.35 1.59,2.54 ; 3.49,-2.54 3.49,-3.35 4.13,-3.35 4.13,-2.54 ; 3.49,2.54 3.49,3.35 4.13,3.35 4.13,2.54 ; 6.03,-2.54 6.03,-3.35 6.67,-3.35 6.67,-2.54 ; 6.03,2.54 6.03,3.35 6.67,3.35 6.67,2.54 ; -7.87,-2.54 7.87,-2.54 7.87,2.54 -7.87,2.54 -7.87,-2.54
Top Designator:
  text ".Designator" at -3.647,-0.357 h1
Top Courtyard:
  lines w0.05: -8.145,-3.7 8.145,-3.7 8.145,3.7 -8.145,3.7 -8.145,-3.7
Top Component Center:
  lines w0.1: -0.5,0 0.5,0 ; 0,-0.5 0,0.5
3D body "61031221821.stp": height 8.52, standoff 0.02, extent -7.62,-3.35 7.62,3.35

## 61031421821 [mm] "Socket Header, Pitch 2.54 mm, SMT, Vertical, dual row, 14p"
height 7.45
pads (14):
  rect 1x1.8 smd: 1(-7.62,-2.6) 2(-7.62,2.6) 3(-5.08,-2.6) 4(-5.08,2.6) 5(-2.54,-2.6) 6(-2.54,2.6) 7(0,-2.6) 8(0,2.6) 9(2.54,-2.6) 10(2.54,2.6) 11(5.08,-2.6) 12(5.08,2.6) 13(7.62,-2.6) 14(7.62,2.6)
Top Overlay:
  circle w0.25: c-8.7,-3.15 r0.125
  lines w0.2: -8.4,-2.615 -9.215,-2.615 -9.215,2.615 -8.4,2.615 ; 8.4,-2.615 9.215,-2.615 9.215,2.615 8.4,2.615
Top Component Outline:
  lines w0.1: -7.94,-2.54 -7.94,-3.35 -7.3,-3.35 -7.3,-2.54 ; -7.94,2.54 -7.94,3.35 -7.3,3.35 -7.3,2.54 ; -5.4,-2.54 -5.4,-3.35 -4.76,-3.35 -4.76,-2.54 ; -5.4,2.54 -5.4,3.35 -4.76,3.35 -4.76,2.54 ; -2.86,-2.54 -2.86,-3.35 -2.22,-3.35 -2.22,-2.54 ; -2.86,2.54 -2.86,3.35 -2.22,3.35 -2.22,2.54 ; -0.32,-2.54 -0.32,-3.35 0.32,-3.35 0.32,-2.54 ; -0.32,2.54 -0.32,3.35 0.32,3.35 0.32,2.54 ; 2.22,-2.54 2.22,-3.35 2.86,-3.35 2.86,-2.54 ; 2.22,2.54 2.22,3.35 2.86,3.35 2.86,2.54 ; 4.76,-2.54 4.76,-3.35 5.4,-3.35 5.4,-2.54 ; 4.76,2.54 4.76,3.35 5.4,3.35 5.4,2.54 ; 7.3,-2.54 7.3,-3.35 7.94,-3.35 7.94,-2.54 ; 7.3,2.54 7.3,3.35 7.94,3.35 7.94,2.54 ; -9.14,-2.54 9.14,-2.54 9.14,2.54 -9.14,2.54 -9.14,-2.54
Top Designator:
  text ".Designator" at -3.647,-0.357 h1
Top Courtyard:
  lines w0.05: -9.415,-3.7 -9.415,3.7 9.415,3.7 9.415,-3.7 -9.415,-3.7
Top Component Center:
  lines w0.1: -0.5,0 0.5,0 ; 0,-0.5 0,0.5
3D body "61031421821.stp": height 8.52, standoff 0.02, extent -8.89,-3.35 8.89,3.35

## 61031621821 [mm] "Socket Header, Pitch 2.54 mm, SMT, Vertical, dual row, 16p"
height 7.45
pads (16):
  rect 1x1.8 smd: 1(-8.89,-2.6) 2(-8.89,2.6) 3(-6.35,-2.6) 4(-6.35,2.6) 5(-3.81,-2.6) 6(-3.81,2.6) 7(-1.27,-2.6) 8(-1.27,2.6) 9(1.27,-2.6) 10(1.27,2.6) 11(3.81,-2.6) 12(3.81,2.6) 13(6.35,-2.6) 14(6.35,2.6) 15(8.89,-2.6) 16(8.89,2.6)
Top Overlay:
  circle w0.25: c-9.97,-3.15 r0.125
  lines w0.2: -9.67,-2.615 -10.485,-2.615 -10.485,2.615 -9.67,2.615 ; 9.67,-2.615 10.485,-2.615 10.485,2.615 9.67,2.615
Top Component Outline:
  lines w0.1: -9.21,-2.54 -9.21,-3.35 -8.57,-3.35 -8.57,-2.54 ; -9.21,2.54 -9.21,3.35 -8.57,3.35 -8.57,2.54 ; -6.67,-2.54 -6.67,-3.35 -6.03,-3.35 -6.03,-2.54 ; -6.67,2.54 -6.67,3.35 -6.03,3.35 -6.03,2.54 ; -4.13,-2.54 -4.13,-3.35 -3.49,-3.35 -3.49,-2.54 ; -4.13,2.54 -4.13,3.35 -3.49,3.35 -3.49,2.54 ; -1.59,-2.54 -1.59,-3.35 -0.95,-3.35 -0.95,-2.54 ; -1.59,2.54 -1.59,3.35 -0.95,3.35 -0.95,2.54 ; 0.95,-2.54 0.95,-3.35 1.59,-3.35 1.59,-2.54 ; 0.95,2.54 0.95,3.35 1.59,3.35 1.59,2.54 ; 3.49,-2.54 3.49,-3.35 4.13,-3.35 4.13,-2.54 ; 3.49,2.54 3.49,3.35 4.13,3.35 4.13,2.54 ; 6.03,-2.54 6.03,-3.35 6.67,-3.35 6.67,-2.54 ; 6.03,2.54 6.03,3.35 6.67,3.35 6.67,2.54 ; 8.57,-2.54 8.57,-3.35 9.21,-3.35 9.21,-2.54 ; 8.57,2.54 8.57,3.35 9.21,3.35 9.21,2.54 ; -10.41,-2.54 -10.41,2.54 10.41,2.54 10.41,-2.54 -10.41,-2.54
Top Designator:
  text ".Designator" at -3.647,-0.357 h1
Top Courtyard:
  lines w0.05: -10.685,-3.7 10.685,-3.7 10.685,3.7 -10.685,3.7 -10.685,-3.7
Top Component Center:
  lines w0.1: -0.5,0 0.5,0 ; 0,-0.5 0,0.5
3D body "61031621821.stp": height 8.52, standoff 0.02, extent -10.16,-3.35 10.16,3.35

## 61031821821 [mm] "Socket Header, Pitch 2.54 mm, SMT, Vertical, dual row, 18p"
height 7.45
pads (18):
  rect 1x1.8 smd: 1(-10.16,-2.6) 2(-10.16,2.6) 3(-7.62,-2.6) 4(-7.62,2.6) 5(-5.08,-2.6) 6(-5.08,2.6) 7(-2.54,-2.6) 8(-2.54,2.6) 9(0,-2.6) 10(0,2.6) 11(2.54,-2.6) 12(2.54,2.6) 13(5.08,-2.6) 14(5.08,2.6) 15(7.62,-2.6) 16(7.62,2.6) 17(10.16,-2.6) 18(10.16,2.6)
Top Overlay:
  circle w0.25: c-11.24,-3.15 r0.125
  lines w0.2: -10.94,-2.615 -11.755,-2.615 -11.755,2.615 -10.94,2.615 ; 10.94,-2.615 11.755,-2.615 11.755,2.615 10.94,2.615
Top Component Outline:
  lines w0.1: -10.48,-2.54 -10.48,-3.35 -9.84,-3.35 -9.84,-2.54 ; -10.48,2.54 -10.48,3.35 -9.84,3.35 -9.84,2.54 ; -7.94,-2.54 -7.94,-3.35 -7.3,-3.35 -7.3,-2.54 ; -7.94,2.54 -7.94,3.35 -7.3,3.35 -7.3,2.54 ; -5.4,-2.54 -5.4,-3.35 -4.76,-3.35 -4.76,-2.54 ; -5.4,2.54 -5.4,3.35 -4.76,3.35 -4.76,2.54 ; -2.86,-2.54 -2.86,-3.35 -2.22,-3.35 -2.22,-2.54 ; -2.86,2.54 -2.86,3.35 -2.22,3.35 -2.22,2.54 ; -0.32,-2.54 -0.32,-3.35 0.32,-3.35 0.32,-2.54 ; -0.32,2.54 -0.32,3.35 0.32,3.35 0.32,2.54 ; 2.22,-2.54 2.22,-3.35 2.86,-3.35 2.86,-2.54 ; 2.22,2.54 2.22,3.35 2.86,3.35 2.86,2.54 ; 4.76,-2.54 4.76,-3.35 5.4,-3.35 5.4,-2.54 ; 4.76,2.54 4.76,3.35 5.4,3.35 5.4,2.54 ; 7.3,-2.54 7.3,-3.35 7.94,-3.35 7.94,-2.54 ; 7.3,2.54 7.3,3.35 7.94,3.35 7.94,2.54 ; 9.84,-2.54 9.84,-3.35 10.48,-3.35 10.48,-2.54 ; 9.84,2.54 9.84,3.35 10.48,3.35 10.48,2.54 ; -11.68,-2.54 -11.68,2.54 11.68,2.54 11.68,-2.54 -11.68,-2.54
Top Designator:
  text ".Designator" at -3.647,-0.357 h1
Top Courtyard:
  lines w0.05: -11.955,-3.7 11.955,-3.7 11.955,3.7 -11.955,3.7 -11.955,-3.7
Top Component Center:
  lines w0.1: -0.5,0 0.5,0 ; 0,-0.5 0,0.5
3D body "61031821821.stp": height 8.52, standoff 0.02, extent -11.43,-3.35 11.43,3.35

## 61032021821 [mm] "Socket Header, Pitch 2.54 mm, SMT, Vertical, dual row, 20p"
height 7.45
pads (20):
  rect 1x1.8 smd: 1(-11.43,-2.6) 2(-11.43,2.6) 3(-8.89,-2.6) 4(-8.89,2.6) 5(-6.35,-2.6) 6(-6.35,2.6) 7(-3.81,-2.6) 8(-3.81,2.6) 9(-1.27,-2.6) 10(-1.27,2.6) 11(1.27,-2.6) 12(1.27,2.6) 13(3.81,-2.6) 14(3.81,2.6) 15(6.35,-2.6) 16(6.35,2.6) 17(8.89,-2.6) 18(8.89,2.6) 19(11.43,-2.6) 20(11.43,2.6)
Top Overlay:
  circle w0.25: c-12.51,-3.15 r0.125
  lines w0.2: -12.21,-2.615 -13.025,-2.615 -13.025,2.615 -12.21,2.615 ; 12.21,-2.615 13.025,-2.615 13.025,2.615 12.21,2.615
Top Component Outline:
  lines w0.1: -11.75,-2.54 -11.75,-3.35 -11.11,-3.35 -11.11,-2.54 ; -11.75,2.54 -11.75,3.35 -11.11,3.35 -11.11,2.54 ; -9.21,-2.54 -9.21,-3.35 -8.57,-3.35 -8.57,-2.54 ; -9.21,2.54 -9.21,3.35 -8.57,3.35 -8.57,2.54 ; -6.67,-2.54 -6.67,-3.35 -6.03,-3.35 -6.03,-2.54 ; -6.67,2.54 -6.67,3.35 -6.03,3.35 -6.03,2.54 ; -4.13,-2.54 -4.13,-3.35 -3.49,-3.35 -3.49,-2.54 ; -4.13,2.54 -4.13,3.35 -3.49,3.35 -3.49,2.54 ; -1.59,-2.54 -1.59,-3.35 -0.95,-3.35 -0.95,-2.54 ; -1.59,2.54 -1.59,3.35 -0.95,3.35 -0.95,2.54 ; 0.95,-2.54 0.95,-3.35 1.59,-3.35 1.59,-2.54 ; 0.95,2.54 0.95,3.35 1.59,3.35 1.59,2.54 ; 3.49,-2.54 3.49,-3.35 4.13,-3.35 4.13,-2.54 ; 3.49,2.54 3.49,3.35 4.13,3.35 4.13,2.54 ; 6.03,-2.54 6.03,-3.35 6.67,-3.35 6.67,-2.54 ; 6.03,2.54 6.03,3.35 6.67,3.35 6.67,2.54 ; 8.57,-2.54 8.57,-3.35 9.21,-3.35 9.21,-2.54 ; 8.57,2.54 8.57,3.35 9.21,3.35 9.21,2.54 ; 11.11,-2.54 11.11,-3.35 11.75,-3.35 11.75,-2.54 ; 11.11,2.54 11.11,3.35 11.75,3.35 11.75,2.54 ; -12.95,-2.54 -12.95,2.54 12.95,2.54 12.95,-2.54 -12.95,-2.54
Top Designator:
  text ".Designator" at -3.647,-0.357 h1
Top Courtyard:
  lines w0.05: -13.225,-3.7 -13.225,3.7 13.225,3.7 13.225,-3.7 -13.225,-3.7
Top Component Center:
  lines w0.1: -0.5,0 0.5,0 ; 0,-0.5 0,0.5
3D body "61032021821.stp": height 8.52, standoff 0.02, extent -12.7,-3.35 12.7,3.35